# Altium footprint library Antenna$.PcbLib: 34 footprints (part 1 of 3)
Each footprint in its own frame and in the unit in brackets; x right, y up, seen from the top. Pads: shape width x height; smd on the part's side, far side on the other; paste and mask are expansions set on the pad; w line width, h text height; cw(c..) or ccw(c..) is an arc to the next point about the centre after c.
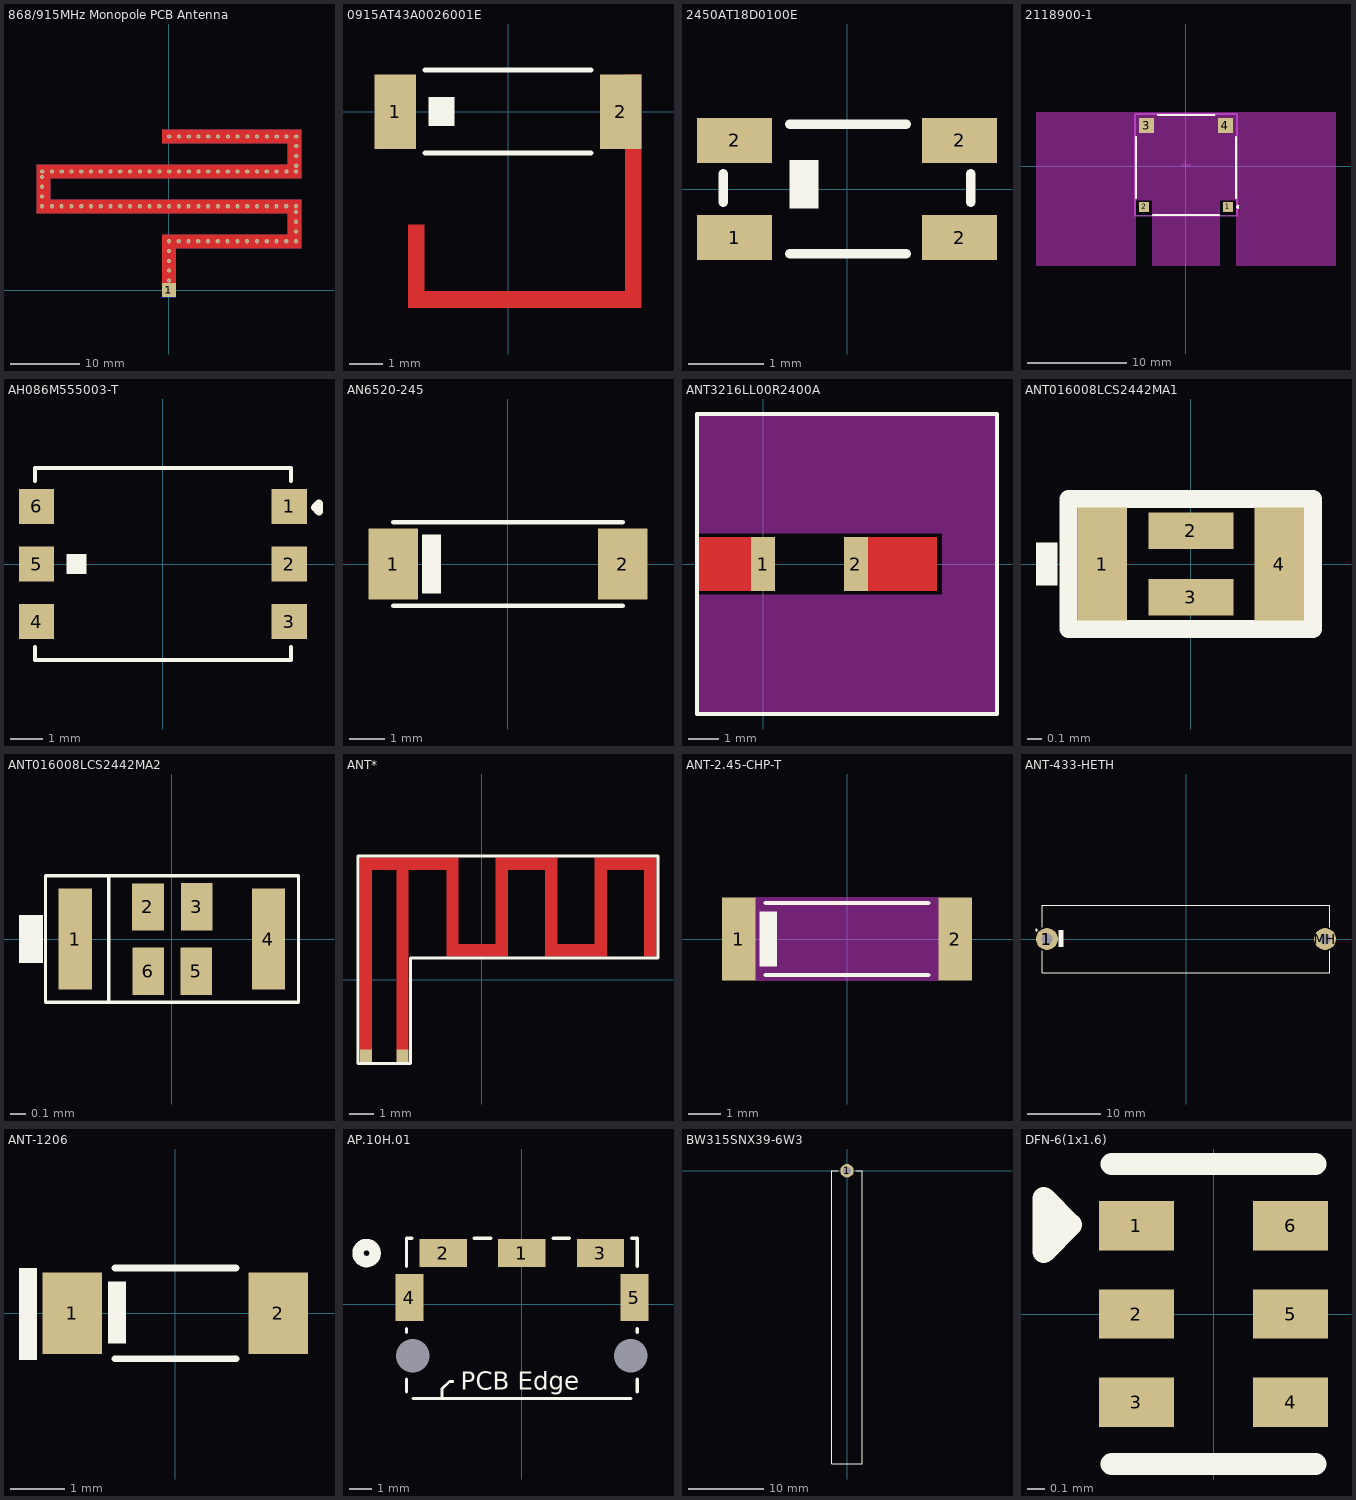
[diagram p0: the footprints below, top view; thin cyan lines are the x and y axes]

## 868/915MHz Monopole PCB Antenna [mm]
pads (2):
  rect 2x2 smd paste+0 mask+0: 1(0,0)
  rect 2x2 smd far side paste+0 mask+0: 1(0,0)
via 9.835,22.043 diameter 0.6 hole 0.3
via 8.435,22.043 diameter 0.6 hole 0.3
via 7.035,22.043 diameter 0.6 hole 0.3
via 5.635,22.043 diameter 0.6 hole 0.3
via 4.235,22.043 diameter 0.6 hole 0.3
via 2.835,22.043 diameter 0.6 hole 0.3
via 1.435,22.043 diameter 0.6 hole 0.3
via 0.035,22.043 diameter 0.6 hole 0.3
via 11.235,22.043 diameter 0.6 hole 0.3
via 12.635,22.043 diameter 0.6 hole 0.3
via 14.035,22.043 diameter 0.6 hole 0.3
via 15.435,22.043 diameter 0.6 hole 0.3
via 16.835,22.043 diameter 0.6 hole 0.3
via 18.235,17.843 diameter 0.6 hole 0.3
via 18.235,19.243 diameter 0.6 hole 0.3
via 18.235,20.643 diameter 0.6 hole 0.3
via 18.235,22.043 diameter 0.6 hole 0.3
via 18.224,17.028 diameter 0.6 hole 0.3
via -8.376,17.028 diameter 0.6 hole 0.3
via -9.776,17.028 diameter 0.6 hole 0.3
via -11.176,17.028 diameter 0.6 hole 0.3
via -12.576,17.028 diameter 0.6 hole 0.3
via -13.976,17.028 diameter 0.6 hole 0.3
via -15.376,17.028 diameter 0.6 hole 0.3
via -16.776,17.028 diameter 0.6 hole 0.3
via 9.824,17.028 diameter 0.6 hole 0.3
via 8.424,17.028 diameter 0.6 hole 0.3
via 7.024,17.028 diameter 0.6 hole 0.3
via 5.624,17.028 diameter 0.6 hole 0.3
via 4.224,17.028 diameter 0.6 hole 0.3
via 2.824,17.028 diameter 0.6 hole 0.3
via 1.424,17.028 diameter 0.6 hole 0.3
via 0.024,17.028 diameter 0.6 hole 0.3
via -1.376,17.028 diameter 0.6 hole 0.3
via -2.776,17.028 diameter 0.6 hole 0.3
via -4.176,17.028 diameter 0.6 hole 0.3
via -5.576,17.028 diameter 0.6 hole 0.3
via -6.976,17.028 diameter 0.6 hole 0.3
via 11.224,17.028 diameter 0.6 hole 0.3
via 12.624,17.028 diameter 0.6 hole 0.3
via 14.024,17.028 diameter 0.6 hole 0.3
via 15.424,17.028 diameter 0.6 hole 0.3
via 16.824,17.028 diameter 0.6 hole 0.3
via -18.176,17.028 diameter 0.6 hole 0.3
via -18.188,16.214 diameter 0.6 hole 0.3
via -18.188,14.814 diameter 0.6 hole 0.3
via -18.188,13.414 diameter 0.6 hole 0.3
via -8.388,12.014 diameter 0.6 hole 0.3
via -9.788,12.014 diameter 0.6 hole 0.3
via -11.188,12.014 diameter 0.6 hole 0.3
via -12.588,12.014 diameter 0.6 hole 0.3
via -13.988,12.014 diameter 0.6 hole 0.3
via -15.388,12.014 diameter 0.6 hole 0.3
via -16.788,12.014 diameter 0.6 hole 0.3
via -18.188,12.014 diameter 0.6 hole 0.3
via 9.812,12.014 diameter 0.6 hole 0.3
via 8.412,12.014 diameter 0.6 hole 0.3
via 7.012,12.014 diameter 0.6 hole 0.3
via 5.612,12.014 diameter 0.6 hole 0.3
via 4.212,12.014 diameter 0.6 hole 0.3
via 2.812,12.014 diameter 0.6 hole 0.3
via 1.412,12.014 diameter 0.6 hole 0.3
via 0.012,12.014 diameter 0.6 hole 0.3
via -1.388,12.014 diameter 0.6 hole 0.3
via -2.788,12.014 diameter 0.6 hole 0.3
via -4.188,12.014 diameter 0.6 hole 0.3
via -5.588,12.014 diameter 0.6 hole 0.3
via -6.988,12.014 diameter 0.6 hole 0.3
via 18.212,12.014 diameter 0.6 hole 0.3
via 11.212,12.014 diameter 0.6 hole 0.3
via 12.612,12.014 diameter 0.6 hole 0.3
via 14.012,12.014 diameter 0.6 hole 0.3
via 15.412,12.014 diameter 0.6 hole 0.3
via 16.812,12.014 diameter 0.6 hole 0.3
via 18.2,11.2 diameter 0.6 hole 0.3
via 18.2,9.8 diameter 0.6 hole 0.3
via 18.2,8.4 diameter 0.6 hole 0.3
via 18.2,7 diameter 0.6 hole 0.3
via 16.8,7 diameter 0.6 hole 0.3
via 15.4,7 diameter 0.6 hole 0.3
via 14,7 diameter 0.6 hole 0.3
via 12.6,7 diameter 0.6 hole 0.3
via 11.2,7 diameter 0.6 hole 0.3
via 9.8,7 diameter 0.6 hole 0.3
via 8.4,7 diameter 0.6 hole 0.3
via 7,7 diameter 0.6 hole 0.3
via 5.6,7 diameter 0.6 hole 0.3
via 4.2,7 diameter 0.6 hole 0.3
via 2.8,7 diameter 0.6 hole 0.3
via 1.4,7 diameter 0.6 hole 0.3
via 0,7 diameter 0.6 hole 0.3
via 0,5.6 diameter 0.6 hole 0.3
via 0,4.2 diameter 0.6 hole 0.3
via 0,2.8 diameter 0.6 hole 0.3
via 0,1.4 diameter 0.6 hole 0.3
via 0,0 diameter 0.6 hole 0.3
Top Layer:
  region: 19,21 19,23 -1,23 -1,21
  rectangle: -1,-1 1,8
  region: -1,8 -1,6 19,6 19,8
  region: 19,13 17,13 17,6 19,6
  region: 19,11 19,13 -19,13 -19,11
  rectangle: -19,11 -17,18
  region: -19,18 -19,16 19,16 19,18
  rectangle: 17,16 19,23
Bottom Layer:
  rectangle: -1,-1 1,8
  region: 19,21 19,23 -1,23 -1,21
  region: -1,8 -1,6 19,6 19,8
  region: 19,13 17,13 17,6 19,6
  region: 19,11 19,13 -19,13 -19,11
  rectangle: -19,11 -17,18
  region: -19,18 -19,16 19,16 19,18
  rectangle: 17,16 19,23

## 0915AT43A0026001E [mil]
pads (2):
  rect 49.21x88 smd: 1(-133,0) 2(133,0)
Top Layer:
  rectangle: 137.92,-231.59 157.61,44
  rectangle: -117.98,-231.59 157.61,-211.91
  rectangle: -117.98,-231.59 -98.3,-133.17
Top Overlay:
  rectangle: -94,-17 -63,17
  lines w6: -97.89,-49 97.89,-49 ; -97.89,49 97.89,49
3D body "ANT_0915AT43A0026E_JOT.step": height 35, standoff 0, extent -142.01,-44.02 142.01,44.02

## 2450AT18D0100E [mm]
pads (4):
  rect 1x0.6 smd paste+0 mask+0.051: 1(-1.5,-0.65) 2(-1.5,0.65) 2(1.5,-0.65) 2(1.5,0.65)
Top Overlay:
  region: -0.762,0.381 -0.762,-0.254 -0.381,-0.254 -0.381,0.381
  lines w0.127: -1.651,-0.178 -1.651,0.203 ; -0.762,-0.864 0.787,-0.864 ; -0.762,0.864 0.787,0.864 ; 1.651,-0.178 1.651,0.203
3D body "C2917718.step": height 1.22, standoff 0, extent -1.6,-0.81 1.6,0.81

## 2118900-1 [mm]
pads (4):
  rect 1x1 smd: 1(4.2,-4.075) 2(-4.2,-4.075)
  rect 1.5x1.5 smd: 3(-3.95,4.075) 4(3.95,4.075)
Top Overlay:
  lines w0.2: -5,-3.2 -5,2.95 ; -3.325,-4.875 3.325,-4.875 ; -2.825,5.125 2.875,5.125 ; 5,-3.2 5,2.95 ; 5.105,-4.089 5.232,-3.962 5.232,-4.216 5.105,-4.089
Keep-Out Layer:
  rectangle: -3.4,-10.033 3.4,-3.454
  region: -5,5.455 -15.062,5.455 -15.062,-10.027 -5,-10.027
  rectangle: -5,-3.454 5,5.455
  rectangle: 5,-10.027 15.062,5.455
Top Assembly:
  lines w0.2: -5.1,-4.975 5.1,-4.975 5.1,5.225 -5.1,5.225 -5.1,-4.975
  text ".Designator" at 0,0.313 h1
Top Courtyard:
  lines w0.2: -5.1,-4.975 5.1,-4.975 5.1,5.225 -5.1,5.225 -5.1,-4.975
Top Component Center:
  lines w0.1: -0.5,0.125 0.5,0.125 ; 0,-0.375 0,0.625
3D body "Ant_TE_Connectivity_2118900-1_eec.STEP": height 1.01, standoff -0.01, extent -5,-4.875 5,5.125

## AH086M555003-T [mm]
pads (6):
  rect 1.1x1.1 smd: 1(3.95,1.8) 2(3.95,0) 3(3.95,-1.8) 4(-3.95,-1.8) 5(-3.95,0) 6(-3.95,1.8)
Top Overlay:
  region: -3,0 -3,-0.3 -2.8,-0.3 -2.4,-0.3 -2.4,0 -2.4,0.3 -3,0.3
  lines w0.127: -4,-2.6 -4,-3 4,-3 4,-2.6 ; -4,2.6 -4,3 4,3 4,2.6
  lines w0.25: 4.752,1.771 4.879,1.644 4.879,1.898 4.752,1.771
3D body "C94132.step": height 1.02, standoff 0, extent -4.01,-3 4.01,3

## AN6520-245 [mm]
pads (2):
  rect 1.4x2 smd: 1(-3.25,0) 2(3.25,0)
Top Overlay:
  rectangle: -2.437,-0.838 -1.904,0.838
  lines w0.127: -3.25,-1.176 3.25,-1.176 ; -3.25,1.176 3.25,1.176
3D body "AN6520-245.STEP": height 1, standoff 0, extent -3.25,-1.1 3.25,1.1

## ANT3216LL00R2400A [mm]
pads (2):
  rect 0.8x1.8 smd: 1(0,0) 2(3.1,0)
Top Layer:
  region: -0.178,0.9 -2.2,0.9 -2.2,-0.9 -0.178,-0.9
  rectangle: 3.277,-0.9 5.8,0.9
Top Overlay:
  lines w0.127: -2.2,-5 -2.2,5 7.8,5 7.8,-5 -2.2,-5
Keep-Out Layer:
  rectangle: 5.969,-1.067 7.772,1.041
  rectangle: -2.134,1.016 7.772,4.953
  rectangle: -2.134,-4.953 7.772,-1.016
3D body "User Library-1206 SMD Capacitor.step": height 1, standoff 0, extent -0.076,-0.8 3.124,0.8

## ANT016008LCS2442MA1 [mm]
pads (4):
  rect 0.35x0.8 smd paste-1 mask+0: 1(-0.625,0) 4(0.625,0)
  rect 0.6x0.26 smd paste-1 mask+0: 2(0,0.235) 3(0,-0.235)
Top Overlay:
  rectangle: -1.092,-0.152 -0.94,0.152
  lines w0.127: -0.864,-0.457 0.864,-0.457 0.864,0.457 -0.864,0.457 -0.864,-0.457
Top Solder:
  region: 0.765,-0.365 0.45,-0.365 0.45,0.365 0.765,0.365
  region: 0.3,0.055 -0.3,0.055 -0.3,0.365 0.3,0.365
  region: 0.3,-0.365 -0.3,-0.365 -0.3,-0.055 0.3,-0.055
  region: -0.45,-0.365 -0.765,-0.365 -0.765,0.365 -0.45,0.365
3D body "ANT016008LCS2442MA1.STEP": height 0.4, standoff 0, extent -0.8,-0.4 0.8,0.4

## ANT016008LCS2442MA2 [mm]
pads (6):
  rect 0.21x0.64 smd paste-100 mask+0.051: 1(-0.612,0) 4(0.612,0)
  rect 0.2x0.3 smd paste-100 mask+0.051: 2(-0.151,0.203) 3(0.158,0.204) 5(0.154,-0.204) 6(-0.148,-0.204)
Top Overlay:
  rectangle: -0.967,-0.152 -0.815,0.152
  lines w0.02: -0.399,-0.4 -0.399,0.401 ; -0.799,-0.4 0.801,-0.4 0.801,0.401 -0.799,0.401 -0.799,-0.4
Top Paste:
  region: -0.507,0.32 -0.507,-0.32 -0.716,-0.32 -0.716,0.32
  region: 0.258,0.354 0.258,0.154 0.118,0.154 0.118,0.354
  region: 0.716,0.32 0.716,-0.32 0.507,-0.32 0.507,0.32
  region: 0.254,-0.154 0.254,-0.354 0.118,-0.354 0.118,-0.154
  region: -0.112,-0.154 -0.112,-0.354 -0.249,-0.354 -0.249,-0.154
  region: -0.251,0.153 -0.251,0.353 -0.114,0.353 -0.114,0.153
3D body "C209892.step": height 0.41, standoff 0, extent -0.8,-0.41 0.8,0.4

## ANT* [mm]
pads (2):
  rect 0.5x0.5 smd: ANT#(-3.2,-3.08) GND(-4.678,-3.079)
Top Layer:
  rectangle: -3.45,-2.86 -2.95,4.94
  rectangle: -4.928,-2.859 -4.428,4.941
  region: 0.572,4.941 0.572,4.441 3.072,4.441 3.072,4.941
  region: 4.572,4.941 4.572,4.441 7.072,4.441 7.072,4.941
  region: -4.928,4.941 -4.928,4.441 -0.928,4.441 -0.928,4.941
  rectangle: 6.572,0.941 7.072,4.941
  region: 1.072,4.941 0.572,4.941 0.572,0.941 1.072,0.941
  rectangle: -1.428,0.941 -0.928,4.941
  region: 1.072,0.941 1.072,1.441 -1.428,1.441 -1.428,0.941
  region: 5.072,0.941 5.072,1.441 2.572,1.441 2.572,0.941
  rectangle: 2.572,0.941 3.072,4.941
  region: 5.072,4.941 4.572,4.941 4.572,0.941 5.072,0.941
Top Overlay:
  lines w0.127: -2.88,-3.4 -5,-3.4 -5,5.01 7.14,5.01 7.14,0.87 -2.87,0.87 -2.87,-3.4

## ANT-2.45-CHP-T [mm]
pads (2):
  rect 1.02x2.54 smd: 1(-3.302,0) 2(3.302,0)
Top Overlay:
  rectangle: -2.667,-0.838 -2.134,0.838
  lines w0.127: -2.474,-1.1 2.474,-1.1 ; -2.474,1.1 2.474,1.1
Keep-Out Layer:
  region: 2.794,-1.27 -2.794,-1.27 -2.794,1.27 2.794,1.27
3D body "step_temp.STEP": height 1.02, standoff 0, extent -3.302,-1.143 3.302,1.143

## ANT-433-HETH [mm]
pads (2):
  round 3 hole 1.52: 1(-19.05,0) MH(19.05,0)
Top Overlay:
  rectangle: -17.45,-1.067 -16.789,1.245
  lines w0.127: -19.71,-4.597 -19.71,-1.626 ; -19.71,1.626 -19.71,4.597 ; -19.685,-4.597 19.71,-4.597 19.71,-1.626 ; -19.685,4.597 19.71,4.597 19.71,1.626 ; -20.498,1.067 -20.498,1.372 -20.345,1.219 -20.498,1.067
3D body "ANT-433-HETH.STEP": height 11.68, standoff -4.86, extent -19.69,-4.572 19.69,4.572

## ANT-1206 [mm]
pads (2):
  rect 1.1x1.5 smd: 1(-1.9,0) 2(1.9,0)
Top Overlay:
  rectangle: -1.245,-0.559 -0.914,0.584
  region: -2.555,0.838 -2.886,0.838 -2.886,-0.864 -2.555,-0.864
  lines w0.127: -1.118,-0.838 1.118,-0.838 ; -1.118,0.838 1.118,0.838
3D body "User Library-1206 SMD Capacitor.step": height 1, standoff 0, extent -1.599,-0.799 1.601,0.801

## AP.10H.01 [mil]
pads (7):
  rect 83x49 smd: 1(0,90.05) 2(-137.8,90.05) 3(137.8,90.05)
  rect 49x83 smd: 4(-197.05,12.25) 5(197.05,12.25)
  round 0 hole 59 unplated paste-29.5 mask-29.5: 6(-190.94,-90.05) 7(190.94,-90.05)
Top Overlay:
  circle w20: c-272,90.05 r15
  lines w5: -190.94,-164.85 190.94,-164.85 ; -139.58,-164.85 -139.58,-147.58 -127,-135 -121,-135
  lines w6: -202,-152.74 -202,-131.19 ; -202,-48.91 -202,-42.35 ; -202,66.85 -202,115.75 -192.34,115.75 ; -83.26,115.75 -54.54,115.75 ; 54.54,115.75 83.26,115.75 ; 192.34,115.75 202,115.75 202,66.85 ; 202,-152.74 202,-131.19 ; 202,-48.91 202,-42.35
  text "PCB Edge" at -107.15,-149.36 h31.5
3D body "AP.10H.01.stp": height 275.59, standoff -118.11, extent -216.54,-362.04 216.54,110.4

## BW315SNX39-6W3 [mm]
pads (1):
  round 1.8 hole 1.02: 1(0,0)
Top Overlay:
  lines w0.127: -1.194,0 -2,0 -2,-39 2,-39 2,0 1.194,0

## DFN-6(1x1.6) [mm]
pads (6):
  rect 0.425x0.28 smd: 1(-0.437,0.5) 2(-0.437,0) 3(-0.437,-0.5) 4(0.437,-0.5) 5(0.437,0) 6(0.437,0.5)
Top Overlay:
  lines w0.127: -0.576,-0.851 0.576,-0.851 ; -0.576,0.851 0.576,0.851 ; -0.962,0.353 -0.962,0.658 -0.81,0.505 -0.962,0.353
3D body "AT2659.step": height 0.86, standoff 0, extent -0.542,-0.802 0.546,0.798